# Altium footprint library PrzetwornicaStepDOWN.PcbLib: 1 footprints
Each footprint in its own frame and in the unit in brackets; x right, y up, seen from the top. Pads: shape width x height; smd on the part's side, far side on the other; paste and mask are expansions set on the pad; w line width, h text height; cw(c..) or ccw(c..) is an arc to the next point about the centre after c.
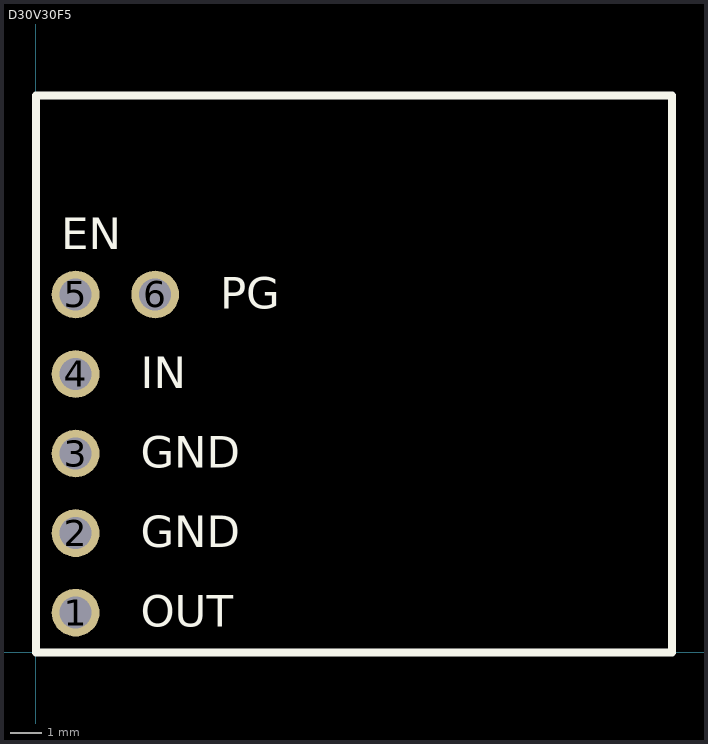
[diagram p0: the footprint, top view; thin cyan lines are the x and y axes]

## D30V30F5 [mil]
pads (6):
  round 60 hole 40: 1(50,50) 2(50,150) 3(50,250) 4(50,350) 5(50,450) 6(150,450)
Top Overlay:
  lines w10: 0,0 0,700 800,700 800,0 0,0
  text "OUT" at 132,32 h40
  text "GND" at 132,132 h40
  text "GND" at 132,232 h40
  text "IN" at 132,332 h40
  text "EN" at 32,507 h40
  text "PG" at 232,432 h40